# Altium schematic symbol library Type-C Tester.SchLib: 14 symbols
Pins are listed as number, name and electrical type; pins without a type are passive.

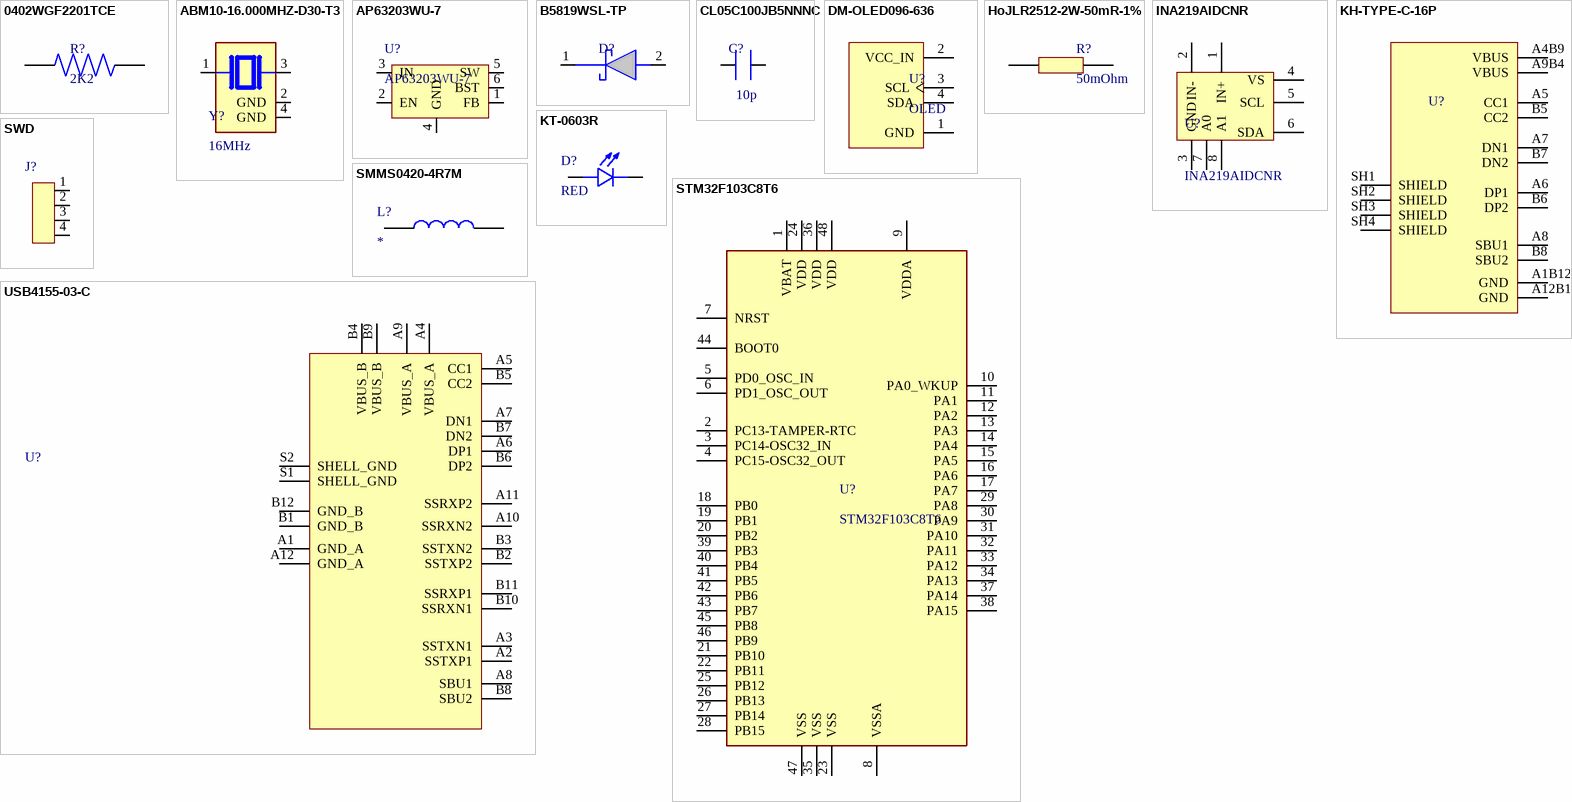
[diagram p0: symbols 0402WGF2201TCE to USB4155-03-C]

## 0402WGF2201TCE
designator R?, comment 2K2
Unchecked RND 1550402WGF2201TCE SMD Resistor Dimensions L x W x H: 1 x 0.5 x 0.35 mm Temperature range: -55 ... 155 °C Construction form: 0402... Uncategorized      100ppm/°C
footprint RESC1005X40N
pins: 1, 2

## ABM10-16.000MHZ-D30-T3
designator Y?, comment 16MHz
Crystal 16MHz ±20ppm (Tol) ±30ppm (Stability) 10pF FUND 150Ohm 4-Pin Ultra Mini-CSMD T/R; Manufacturer: Abracon; Manufacturer Part Number: ABM10-16.000MHZ-D30-T3; ESR (Equivalent Series Resistance): 150Ω; Frequency Tolerance: 0.002%; Supplier: DigiKey; Supplier Part Number: 535-10923-6-ND; RoHS: Compliant; Category: Crystals; Stock: 35847; Pricing: 1=1.2, 10=1.044, 25=0.9876, 50=0.9468, 100=0.9076, 250=0.85828, 500=0.82278, 1000=0.78877 (USD); Case/Package: CSMD; China RoHS: Compliant; Country of Origin: Taiwan; Depth: 2mm; Diameter: 500µm; Frequency: 16MHz; Frequency Stability: 30ppm; Height: 700µm; Height - Seated (Max): 500µm; Harmonized Tariff Schedule (HTS) Code: 8541.60.00.50; Introduction Date: 2012-05-08; Lead Free: Lead Free; Length: 2.5mm; Lifecycle Status: Production; Load Capacitance: 10pF; Max Operating Temperature: 85°C; Min Operating Temperature: -40°C; Mounting Technology: Surface Mount; Pins: 4; REACH SVHC: Unaffected; Schedule B: 8541600025, 8541600025|8541600025, 8541600025|8541600025|8541600025, 8541600025|8541600025|8541600025|8541600025; ESR: 150Ω; Termination: SMD/SMT; Tolerance: 0.002%; Width: 2mm; ComponentLink1URL: https://datasheet.octopart.com:443/ABM10-16.000MHZ-D30-T3-Abracon-datasheet-41232962.pdf?src-supplier=TME; ComponentLink1Description: https://datasheet.octopart.com:443/ABM10-16.000MHZ-D30-T3-Abracon-datasheet-41232962.pdf?src-supplier=TME; ComponentLink2URL: https://datasheet.octopart.com:443/ABM10-16.000MHZ-D30-T3-Abracon-datasheet-182204619.pdf?src-supplier=IHS; ComponentLink2Description: https://datasheet.octopart.com:443/ABM10-16.000MHZ-D30-T3-Abracon-datasheet-182204619.pdf?src-supplier=IHS; ComponentLink3URL: https://datasheet.octopart.com:443/ABM10-16.000MHZ-D30-T3-Abracon-datasheet-13380592.pdf?src-supplier=Upverter; ComponentLink3Description: https://datasheet.octopart.com:443/ABM10-16.000MHZ-D30-T3-Abracon-datasheet-13380592.pdf?src-supplier=Upverter; ComponentLink4URL: https://datasheet.octopart.com:443/ABM10-16.000MHZ-D30-T3-Abracon-datasheet-11045593.pdf?src-supplier=Upverter; ComponentLink4Description: https://datasheet.octopart.com:443/ABM10-16.000MHZ-D30-T3-Abracon-datasheet-11045593.pdf?src-supplier=Upverter; ComponentLink5URL: https://datasheet.octopart.com:443/ABM10-16.000MHZ-D30-T3-Abracon-datasheet-8882520.pdf?src-supplier=Upverter; ComponentLink5Description: https://datasheet.octopart.com:443/ABM10-16.000MHZ-D30-T3-Abracon-datasheet-8882520.pdf?src-supplier=Upverter; ComponentLink6URL: https://datasheet.octopart.com:443/ABM10-16.000MHZ-D30-T3-Abracon-datasheet-8456701.pdf?src-supplier=Upverter; ComponentLink6Description: https://datasheet.octopart.com:443/ABM10-16.000MHZ-D30-T3-Abracon-datasheet-8456701.pdf?src-supplier=Upverter; ComponentLink7URL: https://datasheet.octopart.com:443/ABM10-16.000MHZ-D30-T3-Abracon-datasheet-8326102.pdf?src-supplier=Upverter; ComponentLink7Description: https://datasheet.octopart.com:443/ABM10-16.000MHZ-D30-T3-Abracon-datasheet-8326102.pdf?src-supplier=Upverter; ComponentLink8URL: https://datasheet.octopart.com:443/ABM10-16.000MHZ-D30-T3-Abracon-datasheet-5401317.pdf?src-supplier=Upverter; ComponentLink8Description: https://datasheet.octopart.com:443/ABM10-16.000MHZ-D30-T3-Abracon-datasheet-5401317.pdf?src-supplier=Upverter; ComponentLink9URL: https://datasheet.octopart.com:443/ABM10-16.000MHZ-D30-T3-Abracon-datasheet-37124829.pdf?src-supplier=Newark; ComponentLink9Description: https://datasheet.octopart.com:443/ABM10-16.000MHZ-D30-T3-Abracon-datasheet-37124829.pdf?src-supplier=Newark; ComponentLink10URL: https://sigma.octopart.com:443/141159849/technical_drawing/Abracon-ABM10-16.000MHZ-D30-T3.pdf?src-supplier=Abracon+SCT; ComponentLink10Description: https://sigma.octopart.com:443/141159849/technical_drawing/Abracon-ABM10-16.000MHZ-D30-T3.pdf?src-supplier=Abracon+SCT; ComponentLink11URL: http://sigma.octopart.com:80/conflict_mineral_statement/Abracon-company-27.pdf?src-supplier=Compliance+Statements; ComponentLink11Description: http://sigma.octopart.com:80/conflict_mineral_statement/Abracon-company-27.pdf?src-supplier=Compliance+Statements
footprint XTAL_ABM10-16.000MHZ-D30-T3
pins: 1, 2 GND (power), 3 2, 4 GND (power)

## AP63203WU-7
designator U?
DC-DC Switching Step-Down Regulator, Fixed, 3.8V to 32V in, 3.3V out, 2A out, TSOT-26-6; Manufacturer: Diodes Inc.; Max Junction Temperature (Tj): 160°C; Max Output Voltage: 3.33V; Max Switching Frequency: 1.1MHz; Min Output Voltage: 3.27V; Nominal Supply Voltage: 12V; Nominal Supply Current: 22µA; Number of Circuits: 1; Topology: Buck; Supplier: Mouser; Supplier Part Number: 621-AP63203WU-7; Manufacturer Part Number: AP63203WU-7; RoHS: Compliant; Category: Voltage Regulators - Switching; Stock: 397; Pricing: 1=0.91, 10=0.67, 50=0.558, 100=0.513, 1000=0.513, 10000=0.411 (USD); Ambient Temperature Range High: 85°C; Case/Package: VSSOP; China RoHS: Compliant; Country of Origin: Mainland China; Export Control Classification Number (ECCN) Code: EAR99; Height: 1mm; Height - Seated (Max): 1mm; Harmonized Tariff Schedule (HTS) Code: 8542.39.00.60; Introduction Date: 2019-01-10; Length: 2.9mm; Lifecycle Status: Production; Max Supply Voltage: 32V; Max Operating Temperature: 85°C; Max Output current: 2A; Min Input Voltage: 3.8V; Min Operating Temperature: -40°C; Min Supply Voltage: 3.8V; Nominal Output Voltage: 3.3V; Number of Outputs: 1; Number of Terminals: 6; Output Current: 2A; Output Voltage: 3.3V; REACH SVHC: Unaffected; Switching Frequency: 1.1MHz; Terminal Pitch: 950µm; Width: 1.6mm; ComponentLink1URL: https://datasheet.octopart.com:443/AP63203WU-7-Diodes-Inc.-datasheet-130008827.pdf?src-supplier=IHS; ComponentLink1Description: https://datasheet.octopart.com:443/AP63203WU-7-Diodes-Inc.-datasheet-130008827.pdf?src-supplier=IHS; ComponentLink2URL: https://sigma.octopart.com:443/138799930/technical_drawing/Diodes-Inc.-AP63203WU-7.pdf?src-supplier=Diodes+Inc+SCT; ComponentLink2Description: https://sigma.octopart.com:443/138799930/technical_drawing/Diodes-Inc.-AP63203WU-7.pdf?src-supplier=Diodes+Inc+SCT
footprint FP-TSOT26-IPC_A
pins: 1 FB (oc), 2 EN (oc), 3 IN (oc), 4 GND (oc), 5 SW (oc), 6 BST (oc)

## B5819WSL-TP
designator D?  (value not drawn)
Rectifier Diode, Schottky, 1 Phase, 1 Element, 1A, 40V V(RRM), Silicon; Manufacturer: MCC; Manufacturer Part Number: B5819WSL-TP; Forward Voltage: 600mV; Max Forward Surge Current (Ifsm): 10A; Max Power Dissipation: 250mW; Number of Elements: 1; Peak Reverse Current: 50µA; Supplier: Future Electronics; Supplier Part Number: B5819WSL-TP; RoHS: Compliant; Category: Rectifier Diodes; Stock: 3000; Pricing: 3000=0.0379, 9000=0.037, 15000=0.0366, 45000=0.0357, 75000=0.0349 (USD); China RoHS: Compliant; Lifecycle Status: Production; Max Operating Temperature: 125°C; Max Output current: 1A; Min Operating Temperature: -65°C; Number of Terminals: 2; REACH SVHC: Unaffected; Reverse Standoff Voltage: 40V
footprint B5819WSL
pins: 1 K, 2 A

## CL05C100JB5NNNC
designator C?  value 10p  (hidden comment: *)
10 pF Â±5% 50V Ceramic Capacitor C0G, NP0 0402 (1005 Metric); MF: Samsung Electro-Mechanics; MP: CL05C100JB5NNNC; SnapEDA_Link: https://www.snapeda.com/parts/CL05C100JB5NNNC/Samsung/view-part/?ref=snap; Package: SMD-2-2 Samsung; Check_prices: https://www.snapeda.com/parts/CL05C100JB5NNNC/Samsung/view-part/?ref=eda
footprint CAPC1005X55N
pins: 1, 2

## DM-OLED096-636
designator U?, comment OLED
footprint MODULE_DM-OLED096-636
pins: 1 GND, 2 VCC_IN, 3 SCL, 4 SDA

## HoJLR2512-2W-50mR-1%
designator R?, comment 50mOhm
Unchecked HOJLR2512-2W-50MR-1% 2512 Alloy Resistor, 0.05Ω ±1%, 50ppm, 2W Chip SMD Resistors
footprint RESC6432X110N
pins: 1, 2

## INA219AIDCNR
designator U?  Manufacturer Part Number: INA219AIDCNR  (hidden comment: *)
26-V 12-bit I2C output digital power monitor 8-SOT-23 -40 to 125; Manufacturer: Texas Instruments; Manufacturer Lifecycle Status: ACTIVE; Accuracy: 1%; Bandwidth: 3.4MHz; Common Mode Rejection Ratio: 100dB; Input Offset Voltage (Vos): 100µV; Max Supply Voltage: 26V; Max Junction Temperature (Tj): 150°C; Max Supply Current: 5mA; Min Input Voltage: 0V; Min Supply Voltage: 3V; Nominal Supply Current: 700µA; Number of Amplifiers: 1; Operating Supply Current: 1mA; Output Current: 10mA; Supplier: DigiKey; Supplier Part Number: 296-23770-1-ND; RoHS: Compliant; Category: Amplifiers - Op Amps, Buffer, Instrumentation; Stock: 58711; Pricing: 1=2.25, 10=1.662, 25=1.5144, 100=1.3524, 250=1.2752, 500=1.23256, 1000=1.1628 (USD); Ambient Temperature Range High: 85°C; Case/Package: SOT-23; Contact Plating: Gold; Features: I²C; Height: 1.45mm; Lead Free: Lead Free; Length: 2.9mm; Lifecycle Status: Production; Max Operating Temperature: 125°C; Min Operating Temperature: -40°C; Number of Outputs: 1; Pins: 8; Output Current per Channel: 10mA; Output Type: Digital; Packaging: Cut Tape; Quiescent Current: 700µA; Radiation Hardening: No; REACH SVHC: Unaffected; Schedule B: 8542330000|8542330000|8542330000, 8542330000|8542330000|8542330000|8542330000|8542330000; Thickness: 1.1mm; Weight: 40.001177mg; Width: 1.63mm; ComponentLink1URL: https://octopart.com:443/opatz8j6/c1?t=mXNZEg2jyD5NyCK_2W6ogI_3c8QRMbRBOLazAHLgy1JlwbZKZyH4b-YuevEo30JEQiTWwC8lz5Tbu-S38pmh9-XLDsCQsNBNDFv0ZPtEAh9Vx9mmiMtTyAa81OfucU8wswp56Gsbxy1LDfR57SITMeoX1a13NcXQgownNrkx-3rEAjCgj7TNf5q988t_Bmtd28MfB-8YodPlVf_HWBaA_YkKbVFMmS-K4EDTzxfG14L7W23rjhR5wMtYaOji5q7itKD0VWsI_Pl-rAba6SpMOYnl8B8vEq--hemeyXquqfeQYa1YyvXap_3pa6lat1BXqCZqGMe0qTFNLIcuieQkNoJTlJe9aMEd3u-pqstJoCS5-cCrgu3PAF_v80BJAeKwFj4S&src-supplier=Texas+Instruments; ComponentLink1Description: https://octopart.com:443/opatz8j6/c1?t=mXNZEg2jyD5NyCK_2W6ogI_3c8QRMbRBOLazAHLgy1JlwbZKZyH4b-YuevEo30JEQiTWwC8lz5Tbu-S38pmh9-XLDsCQsNBNDFv0ZPtEAh9Vx9mmiMtTyAa81OfucU8wswp56Gsbxy1LDfR57SITMeoX1a13NcXQgownNrkx-3rEAjCgj7TNf5q988t_Bmtd28MfB-8YodPlVf_HWBaA_YkKbVFMmS-K4EDTzxfG14L7W23rjhR5wMtYaOji5q7itKD0VWsI_Pl-rAba6SpMOYnl8B8vEq--hemeyXquqfeQYa1YyvXap_3pa6lat1BXqCZqGMe0qTFNLIcuieQkNoJTlJe9aMEd3u-pqstJoCS5-cCrgu3PAF_v80BJAeKwFj4S&src-supplier=Texas+Instruments; ComponentLink2URL: https://datasheet.octopart.com:443/INA219AIDCNR-Texas-Instruments-datasheet-10383171.pdf?src-supplier=Texas+Instruments; ComponentLink2Description: https://datasheet.octopart.com:443/INA219AIDCNR-Texas-Instruments-datasheet-10383171.pdf?src-supplier=Texas+Instruments; ComponentLink3URL: https://datasheet.octopart.com:443/INA219AIDCNR-Texas-Instruments-datasheet-10258484.pdf?src-supplier=Texas+Instruments; ComponentLink3Description: https://datasheet.octopart.com:443/INA219AIDCNR-Texas-Instruments-datasheet-10258484.pdf?src-supplier=Texas+Instruments; ComponentLink4URL: https://sigma.octopart.com:443/49252122/technical_drawing/Texas-Instruments-INA219AIDCNR.pdf?src-supplier=Texas+Instruments; ComponentLink4Description: https://sigma.octopart.com:443/49252122/technical_drawing/Texas-Instruments-INA219AIDCNR.pdf?src-supplier=Texas+Instruments; ComponentLink5URL: https://datasheet.octopart.com:443/INA219AIDCNR-Texas-Instruments-datasheet-102489495.pdf?src-supplier=Upverter; ComponentLink5Description: https://datasheet.octopart.com:443/INA219AIDCNR-Texas-Instruments-datasheet-102489495.pdf?src-supplier=Upverter; ComponentLink6URL: https://datasheet.octopart.com:443/INA219AIDCNR-Texas-Instruments-datasheet-11538655.pdf?src-supplier=Future+Electronics; ComponentLink6Description: https://datasheet.octopart.com:443/INA219AIDCNR-Texas-Instruments-datasheet-11538655.pdf?src-supplier=Future+Electronics; ComponentLink7URL: https://datasheet.octopart.com:443/INA219AIDCNR-Texas-Instruments-datasheet-137316104.pdf?src-supplier=Future+Electronics; ComponentLink7Description: https://datasheet.octopart.com:443/INA219AIDCNR-Texas-Instruments-datasheet-137316104.pdf?src-supplier=Future+Electronics; ComponentLink8URL: https://datasheet.octopart.com:443/INA219AIDCNR-Texas-Instruments-datasheet-24897021.pdf?src-supplier=element14+APAC; ComponentLink8Description: https://datasheet.octopart.com:443/INA219AIDCNR-Texas-Instruments-datasheet-24897021.pdf?src-supplier=element14+APAC; ComponentLink9URL: https://datasheet.octopart.com:443/INA219AIDCNR.-Texas-Instruments-datasheet-62277359.pdf?src-supplier=element14+APAC; ComponentLink9Description: https://datasheet.octopart.com:443/INA219AIDCNR.-Texas-Instruments-datasheet-62277359.pdf?src-supplier=element14+APAC; ComponentLink10URL: https://datasheet.octopart.com:443/INA219AIDCNR-Texas-Instruments-datasheet-164414650.pdf?src-supplier=SHENGYU+ELECTRONICS; ComponentLink10Description: https://datasheet.octopart.com:443/INA219AIDCNR-Texas-Instruments-datasheet-164414650.pdf?src-supplier=SHENGYU+ELECTRONICS; ComponentLink11URL: https://datasheet.octopart.com:443/INA219AIDCNR-Texas-Instruments-datasheet-159115060.pdf?src-supplier=LCSC; ComponentLink11Description: https://datasheet.octopart.com:443/INA219AIDCNR-Texas-Instruments-datasheet-159115060.pdf?src-supplier=LCSC; ComponentLink12URL: https://datasheet.octopart.com:443/INA219AIDCNR-Texas-Instruments-datasheet-140571431.pdf?src-supplier=Arrow.cn; ComponentLink12Description: https://datasheet.octopart.com:443/INA219AIDCNR-Texas-Instruments-datasheet-140571431.pdf?src-supplier=Arrow.cn; ComponentLink13URL: https://datasheet.octopart.com:443/INA219AIDCNR-Texas-Instruments-datasheet-14155040.pdf?src-supplier=iiiC; ComponentLink13Description: https://datasheet.octopart.com:443/INA219AIDCNR-Texas-Instruments-datasheet-14155040.pdf?src-supplier=iiiC; ComponentLink14URL: http://sigma.octopart.com:80/reach_statement/Texas-Instruments-company-64.pdf?src-supplier=Compliance+Statements; ComponentLink14Description: http://sigma.octopart.com:80/reach_statement/Texas-Instruments-company-64.pdf?src-supplier=Compliance+Statements; ComponentLink15URL: http://sigma.octopart.com:80/conflict_mineral_statement/Texas-Instruments-company-63.pdf?src-supplier=Compliance+Statements; ComponentLink15Description: http://sigma.octopart.com:80/conflict_mineral_statement/Texas-Instruments-company-63.pdf?src-supplier=Compliance+Statements
footprint SOT65P280X145-8N
pins: 1 IN+, 2 IN-, 3 GND, 4 VS, 5 SCL, 6 SDA, 7 A0, 8 A1

## KH-TYPE-C-16P
designator U?  (value not drawn)
Unchecked KH-TYPE-C-16P 3A 1 Horizontal attachment 16P Female -40℃~+85℃ Type-C SMD USB Connectors ROHS Uncategorized
footprint KINGHELM_KH-TYPE-C-16P
pins: A1B12 GND, A4B9 VBUS, A5 CC1, A6 DP1, A7 DN1, A8 SBU1, A9B4 VBUS, A12B1 GND, B5 CC2, B6 DP2, B7 DN2, B8 SBU2, SH1 SHIELD, SH2 SHIELD, SH3 SHIELD, SH4 SHIELD

## KT-0603R
designator D?, comment RED
Unchecked KT-0603R 615nm~630nm 120° 1.9V~2.2V red 0603 SMD mount 1.6mm*800μm*700μm Uncategorized
footprint LED_KT-0603R
pins: A, C

## SMMS0420-4R7M
designator L?
Manufacturer Part Description Category Supply Info / Unchecked SMMS0420-4R7M 4.7μH ±20% 3A Inductor Uncategorized
footprint SMMS04204R7M
pins: 1 +, 2 -

## STM32F103C8T6
designator U?
MCU 32-bit STM32F1 ARM Cortex M3 RISC 64KB Flash 2.5V/3.3V 48-Pin LQFP Tray; Manufacturer: STMicroelectronics; Manufacturer Package Identifier: ai14911d; ADC Channels (Resolution): 10-Ch 12-Bit; Address Bus Width: 32b; Density: 512kb; EEPROM Memory Size: 0B; Frequency: 72MHz; Interface: CAN, USB; Max Power Dissipation: 363mW; Max Supply Current: 50mA; Max Supply Voltage: 3.6V; Min Supply Voltage: 2V; Nominal Supply Current: 1.7µA; Nominal Supply Voltage (DC): 3.3V; Number of A/D Converters: 2; Number of ADC Channels: 10; Number of Bits: 32; Number of I/Os: 37; Number of Interrupts: 16; Number of Programmable I/O: 48; Number of PWM Channels: 1; Number of Timers/Counters: 4; Number of USART Channels: 3; Oscillator Type: Internal; Peripherals: POR, RTC; RAM Size: 20kB; Watchdog Timer: Yes; Supplier: Avnet; Supplier Part Number: STM32F103C8T6; Manufacturer Part Number: STM32F103C8T6; RoHS: Compliant; Category: Microcontrollers; Stock: 41822; Pricing: 1=3.12425, 2=3.09755, 4=3.05349, 8=3.00943, 16=2.96537 (USD); Case/Package: LFQFP; China RoHS: Compliant; Core Architecture: ARM; Country of Origin: Malaysia; Data Bus Width: 32b; Export Control Classification Number (ECCN) Code: 3A991.A.2; Flash Memory Size: 64kB; Height: 1.45mm; Height - Seated (Max): 1.6mm; Harmonized Tariff Schedule (HTS) Code: 8542.31.00.25; Introduction Date: 2007-06-07; Lead Free: Lead Free; Length: 7mm; Lifecycle Status: Production; Clock Frequency: 72MHz; Max Operating Temperature: 85°C; Memory Size: 64kB; Memory Format: FLASH; Min Operating Temperature: -40°C; Mounting Technology: Surface Mount; Number of Channels: 10; Number of I2C Channels: 2; Pins: 48; Number of SPI Channels: 2; Number of Terminals: 48; Operating Supply Voltage: 3.6V; Radiation Hardening: No; REACH SVHC: Unaffected; Schedule B: 8542310000; Temperature Grade: Industrial; Terminal Pitch: 500µm; Termination: SMD/SMT; Width: 7mm; ComponentLink1URL: https://datasheet.octopart.com:443/STM32F103C8T6-STMicroelectronics-datasheet-177520228.pdf?src-supplier=IHS; ComponentLink1Description: https://datasheet.octopart.com:443/STM32F103C8T6-STMicroelectronics-datasheet-177520228.pdf?src-supplier=IHS; ComponentLink2URL: https://datasheet.octopart.com:443/STM32F103C8T6-STMicroelectronics-datasheet-10330614.pdf?src-supplier=Newark; ComponentLink2Description: https://datasheet.octopart.com:443/STM32F103C8T6-STMicroelectronics-datasheet-10330614.pdf?src-supplier=Newark; ComponentLink3URL: https://datasheet.octopart.com:443/STM32F103C8T6-STMicroelectronics-datasheet-16839800.pdf?src-supplier=Newark; ComponentLink3Description: https://datasheet.octopart.com:443/STM32F103C8T6-STMicroelectronics-datasheet-16839800.pdf?src-supplier=Newark; ComponentLink4URL: https://datasheet.octopart.com:443/STM32F103C8T6-STMicroelectronics-datasheet-48026265.pdf?src-supplier=ICpick; ComponentLink4Description: https://datasheet.octopart.com:443/STM32F103C8T6-STMicroelectronics-datasheet-48026265.pdf?src-supplier=ICpick; ComponentLink5URL: https://datasheet.octopart.com:443/STM32F103C8T6-STMicroelectronics-datasheet-14363502.pdf?src-supplier=Farnell; ComponentLink5Description: https://datasheet.octopart.com:443/STM32F103C8T6-STMicroelectronics-datasheet-14363502.pdf?src-supplier=Farnell; ComponentLink6URL: https://datasheet.octopart.com:443/STM32F103C8T6-STMicroelectronics-datasheet-500013.pdf?src-supplier=Farnell; ComponentLink6Description: https://datasheet.octopart.com:443/STM32F103C8T6-STMicroelectronics-datasheet-500013.pdf?src-supplier=Farnell; ComponentLink7URL: https://datasheet.octopart.com:443/STM32F103C8T6-STMicroelectronics-datasheet-8365036.pdf?src-supplier=Farnell; ComponentLink7Description: https://datasheet.octopart.com:443/STM32F103C8T6-STMicroelectronics-datasheet-8365036.pdf?src-supplier=Farnell; ComponentLink8URL: https://datasheet.octopart.com:443/STM32F103C8T6-STMicroelectronics-datasheet-6396519.pdf?src-supplier=Verical; ComponentLink8Description: https://datasheet.octopart.com:443/STM32F103C8T6-STMicroelectronics-datasheet-6396519.pdf?src-supplier=Verical; ComponentLink9URL: https://datasheet.octopart.com:443/STM32F103C8T6-STMicroelectronics-datasheet-21407612.pdf?src-supplier=element14+APAC; ComponentLink9Description: https://datasheet.octopart.com:443/STM32F103C8T6-STMicroelectronics-datasheet-21407612.pdf?src-supplier=element14+APAC; ComponentLink10URL: https://datasheet.octopart.com:443/STM32F103C8T6-STMicroelectronics-datasheet-8700640.pdf?src-supplier=element14; ComponentLink10Description: https://datasheet.octopart.com:443/STM32F103C8T6-STMicroelectronics-datasheet-8700640.pdf?src-supplier=element14; ComponentLink11URL: https://datasheet.octopart.com:443/STM32F103C8T6-STMicroelectronics-datasheet-165583531.pdf?src-supplier=SOS+electronic; ComponentLink11Description: https://datasheet.octopart.com:443/STM32F103C8T6-STMicroelectronics-datasheet-165583531.pdf?src-supplier=SOS+electronic; ComponentLink12URL: https://datasheet.octopart.com:443/STM32F103C8T6-STMicroelectronics-datasheet-14106722.pdf?src-supplier=iiiC; ComponentLink12Description: https://datasheet.octopart.com:443/STM32F103C8T6-STMicroelectronics-datasheet-14106722.pdf?src-supplier=iiiC; ComponentLink13URL: https://datasheet.octopart.com:443/STM32F103C8T6-STMicroelectronics-datasheet-17594274.pdf?src-supplier=TME; ComponentLink13Description: https://datasheet.octopart.com:443/STM32F103C8T6-STMicroelectronics-datasheet-17594274.pdf?src-supplier=TME; ComponentLink14URL: https://datasheet.octopart.com:443/STM32F103C8T6-STMicroelectronics-datasheet-148251.pdf?src-supplier=Nu+Horizons; ComponentLink14Description: https://datasheet.octopart.com:443/STM32F103C8T6-STMicroelectronics-datasheet-148251.pdf?src-supplier=Nu+Horizons
footprint QFP50P900X900X160-48N
pins: 1 VBAT, 2 PC13-TAMPER-RTC, 3 PC14-OSC32_IN, 4 PC15-OSC32_OUT, 5 PD0_OSC_IN, 6 PD1_OSC_OUT, 7 NRST, 8 VSSA, 9 VDDA, 10 PA0_WKUP, 11 PA1, 12 PA2, 13 PA3, 14 PA4, 15 PA5, 16 PA6, 17 PA7, 18 PB0, 19 PB1, 20 PB2, 21 PB10, 22 PB11, 23 VSS, 24 VDD, 25 PB12, 26 PB13, 27 PB14, 28 PB15, 29 PA8, 30 PA9, 31 PA10, 32 PA11, 33 PA12, 34 PA13, 35 VSS, 36 VDD, 37 PA14, 38 PA15, 39 PB3, 40 PB4, 41 PB5, 42 PB6, 43 PB7, 44 BOOT0, 45 PB8, 46 PB9, 47 VSS, 48 VDD

## SWD
designator J?  (value not drawn)
footprint SWD
pins: 1 (oc), 2 (oc), 3 (oc), 4 (oc)

## USB4155-03-C
designator U?  (value not drawn)
USB Connector, 24 Contact(s), Female, Right Angle, Surface Mount Terminal, Plug; Manufacturer: Global Connector Technology; Manufacturer Part Number: USB4155-03-C; Contact Resistance: 50mΩ; Current Rating: 5A; Dielectric Material: Liquid Crystal Polymer; Insulation Resistance: 100MΩ; Number of Contacts: 24; Number of Ports: 1; Plating Thickness: 76.2nm; Row Spacing: 1.5mm; Voltage Rating: 20V; Supplier: DigiKey; Supplier Part Number: 2073-USB4155-03-CDKR-ND; RoHS: Compliant; Category: USB Connectors; Stock: 15032; Pricing: 1=1.66, 10=1.407, 25=1.3188, 50=1.2556, 100=1.1956, 250=1.12064, 500=1.06712 (USD); China RoHS: Compliant; Contact Material: Gold, Nickel; Gender: Female; Height: 2.1mm; Insulation Color: Black; Lifecycle Status: Production; Max Operating Temperature: 85°C; Min Operating Temperature: -30°C; Pins: 24; Number of Positions: 24; Number of Rows: 2; Orientation: Right Angle; REACH SVHC: Unaffected; Shell Finish: Nickel; Shell Material: Stainless Steel; Terminal Pitch: 500µm; ComponentLink1URL: https://datasheet.octopart.com:443/USB4155-03-C-GCT-datasheet-166933378.pdf?src-supplier=IHS; ComponentLink1Description: https://datasheet.octopart.com:443/USB4155-03-C-GCT-datasheet-166933378.pdf?src-supplier=IHS; ComponentLink2URL: https://datasheet.octopart.com:443/USB4155-03-C-GCT-datasheet-169726654.pdf?src-supplier=Future+Electronics; ComponentLink2Description: https://datasheet.octopart.com:443/USB4155-03-C-GCT-datasheet-169726654.pdf?src-supplier=Future+Electronics; ComponentLink3URL: https://datasheet.octopart.com:443/USB4155-03-C-Global-Connector-Technology-datasheet-152746743.pdf?src-supplier=Future+Electronics; ComponentLink3Description: https://datasheet.octopart.com:443/USB4155-03-C-Global-Connector-Technology-datasheet-152746743.pdf?src-supplier=Future+Electronics; ComponentLink4URL: https://datasheet.octopart.com:443/USB4155-03-C-GCT-datasheet-188945506.pdf?src-supplier=TME; ComponentLink4Description: https://datasheet.octopart.com:443/USB4155-03-C-GCT-datasheet-188945506.pdf?src-supplier=TME; ComponentLink5URL: https://datasheet.octopart.com:443/USB4155-03-C-GCT-datasheet-166929330.pdf?src-supplier=TME; ComponentLink5Description: https://datasheet.octopart.com:443/USB4155-03-C-GCT-datasheet-166929330.pdf?src-supplier=TME
footprint GCT_USB4155-03-C_REVA
pins: A1 GND_A, A2 SSTXP1, A3 SSTXN1, A4 VBUS_A, A5 CC1, A6 DP1, A7 DN1, A8 SBU1, A9 VBUS_A, A10 SSRXN2, A11 SSRXP2, A12 GND_A, B1 GND_B, B2 SSTXP2, B3 SSTXN2, B4 VBUS_B, B5 CC2, B6 DP2, B7 DN2, B8 SBU2, B9 VBUS_B, B10 SSRXN1, B11 SSRXP1, B12 GND_B, S1 SHELL_GND, S2 SHELL_GND